# Altium footprint library Modulos.PcbLib: 11 footprints
Each footprint in its own frame and in the unit in brackets; x right, y up, seen from the top. Pads: shape width x height; smd on the part's side, far side on the other; paste and mask are expansions set on the pad; w line width, h text height; cw(c..) or ccw(c..) is an arc to the next point about the centre after c.
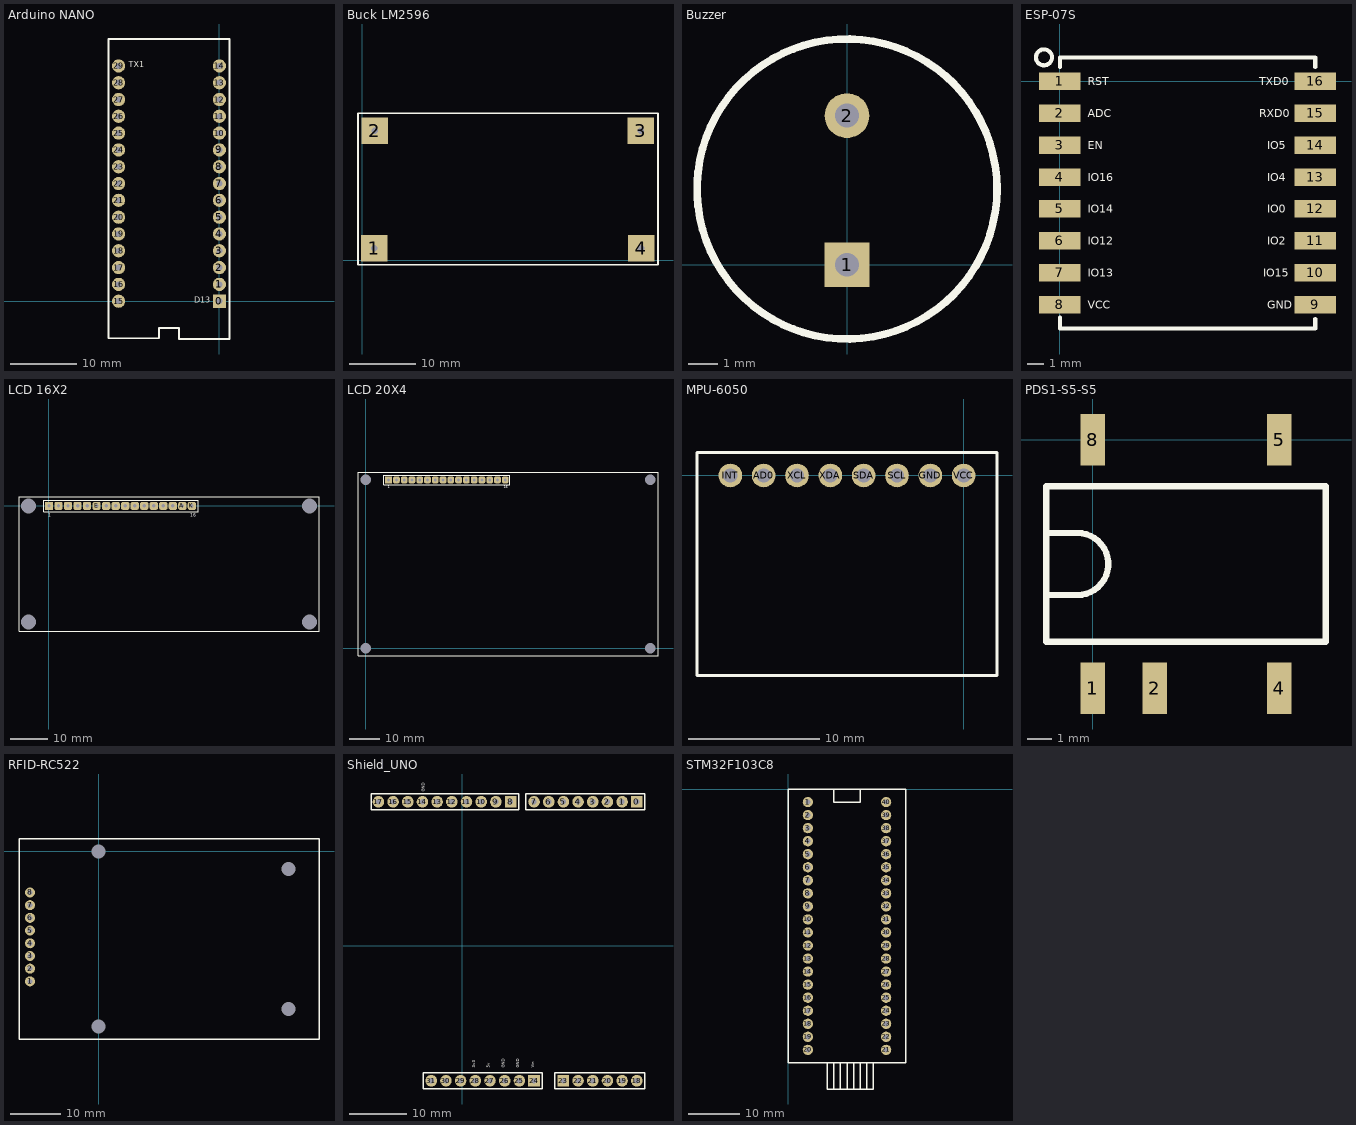
[diagram p0: the footprints below, top view; thin cyan lines are the x and y axes]

## Arduino NANO [mm]
pads (30):
  rect 2x2 hole 0.9: 0(0,0)
  round 2 hole 0.9: 1(0,2.54) 2(0,5.08) 3(0,7.62) 4(0,10.16) 5(0,12.7) 6(0,15.24) 7(0,17.78) 8(0,20.32) 9(0,22.86) 10(0,25.4) 11(0,27.94) 12(0,30.48) 13(0,33.02) 14(0,35.56) 15(-15.24,0) 16(-15.24,2.54) 17(-15.24,5.08) 18(-15.24,7.62) 19(-15.24,10.16) 20(-15.24,12.7) 21(-15.24,15.24) 22(-15.24,17.78) 23(-15.24,20.32) 24(-15.24,22.86) 25(-15.24,25.4) 26(-15.24,27.94) 27(-15.24,30.48) 28(-15.24,33.02) 29(-15.24,35.56)
Top Overlay:
  lines w0.254: -16.764,-5.588 -9.144,-5.588 -9.144,-4.064 -7.62,-4.064 -6.096,-4.064 -6.096,-5.715 1.524,-5.715 1.524,39.624 -16.764,39.624 -16.764,-5.588
  text "D13" at -3.81,-0.508 h1.52
  text "TX1" at -13.716,35.052 h1.52
3D body "User Library-ARDUINO_NANO_V3.STEP": height 16.1, standoff -2.5, extent -16.62,-5.62 1.38,39.38

## Buck LM2596 [mm]
pads (4):
  rect 4x4 hole 1: 1(1.803,1.803) 2(1.854,19.456) 3(41.808,19.456) 4(41.834,1.778)
Top Overlay:
  lines w0.254: -0.66,-0.66 44.374,-0.66 44.374,22.047 -0.66,22.047 -0.66,-0.66
3D body "LM2596_Buck_Converter.stp": height 13, standoff -1, extent 0.344,0 43.344,21.15

## Buzzer [mm] "AI-1027-TWT-5V-2-R"
pads (2):
  rect 1.5x1.5 hole 0.8: 1(0,0)
  round 1.5 hole 0.8: 2(0,5)
Top Overlay:
  circle w0.254: c0,2.54 r5.029
3D body "Buzzer_TDK_pitch_5.stp": height 9, standoff -2, extent -6.104,-3.56 6.096,8.64

## ESP-07S [mm] "ESP-07S WIFI MODULE"
pads (16):
  rect 2.6x1.1 smd: 1(0,0) 2(0,-2) 3(0,-4) 4(0,-6) 5(0,-8) 6(0,-10) 7(0,-12) 8(0,-14) 9(16,-14) 10(16,-12) 11(16,-10) 12(16,-8) 13(16,-6) 14(16,-4) 15(16,-2) 16(16,0)
Top Overlay:
  circle w0.254: c-1,1.5 r0.5
  lines w0.254: 0,-14.8 0,-15.5 16,-15.5 16,-14.9 ; 0,0.9 0,1.5 16,1.5 16,0.9
  text "RST" at 1.75,-0.25 h0.5
  text "ADC" at 1.75,-2.25 h0.5
  text "EN" at 1.75,-4.25 h0.5
  text "IO16" at 1.75,-6.25 h0.5
  text "IO14" at 1.75,-8.25 h0.5
  text "IO12" at 1.75,-10.25 h0.5
  text "IO13" at 1.75,-12.25 h0.5
  text "VCC" at 1.75,-14.25 h0.5
  text "GND" at 13,-14.25 h0.5
  text "IO15" at 12.75,-12.25 h0.5
  text "IO2" at 13,-10.25 h0.5
  text "IO0" at 13,-8.25 h0.5
  text "IO4" at 13,-6.25 h0.5
  text "IO5" at 13,-4.25 h0.5
  text "RXD0" at 12.5,-2.25 h0.5
  text "TXD0" at 12.5,-0.25 h0.5

## LCD 16X2 [mm]
pads (20):
  rrect50% 2.2x2.2 hole 0.9 unplated: A(35.56,0) D0(15.24,0) D1(17.78,0) D2(20.32,0) D3(22.86,0) D4(25.4,0) D5(27.94,0) D6(30.48,0) D7(33.02,0) E(12.7,0) K(38.1,0) RS(7.62,0) RW(10.16,0) VDD(2.54,0) VO(5.08,0)
  rect 2.2x2.2 hole 0.9 unplated: VSS(0,0)
  round 2 hole 4 unplated: ""(-5.5,-31) ""(-5.5,0) ""(69.5,-31) ""(69.5,0)
Top Overlay:
  lines w0.254: -8,-33.5 72,-33.5 72,2.5 -8,2.5 -8,-33.5 ; -1.414,-1.612 39.734,-1.612 39.734,1.436 -1.414,1.436 -1.414,-1.612
  text "16" at 37.702,-2.882 h0.89
  text "1" at -0.144,-2.882 h0.89
3D body "User Library-Header_Male_10Pin.STEP": height 10, standoff -1.54, extent -1.27,-1.245 24.13,1.245
3D body "User Library-Header_Male_6Pin.STEP": height 10, standoff -1.54, extent 24.13,-1.245 39.37,1.245
3D body "User Library-LCD 16x2 JHD162A.step": height 17.8, standoff 4.65, extent -8.021,-33.613 71.979,2.388

## LCD 20X4 [mm]
pads (20):
  rrect50% 2.2x2.2 hole 0.9 unplated: A(43.06,55) D0(22.74,55) D1(25.28,55) D2(27.82,55) D3(30.36,55) D4(32.9,55) D5(35.44,55) D6(37.98,55) D7(40.52,55) E(20.2,55) K(45.6,55) RS(15.12,55) RW(17.66,55) VDD(10.04,55) VO(12.58,55)
  rect 2.2x2.2 hole 0.9 unplated: VSS(7.5,55)
  round 1.524 hole 3.4 unplated: ""(0,0) ""(0,55) ""(93,0) ""(93,55)
Top Overlay:
  lines w0.254: -2.5,-2.46 95.5,-2.46 95.5,57.54 -2.5,57.54 -2.5,-2.46 ; 5.976,53.476 47.124,53.476 47.124,56.524 5.976,56.524 5.976,53.476
  text "16" at 45.092,52.206 h0.89
  text "1" at 7.246,52.206 h0.89
3D body "User Library-Header_Male_8Pin.STEP": height 10, standoff -1.54, extent 26.55,53.755 46.87,56.245
3D body "User Library-Header_Male_8Pin.STEP": height 10, standoff -1.54, extent 6.23,53.755 26.55,56.245
3D body "ERM2004-2_3D.stp": height 18.97, standoff 4.97, extent -2.511,-2.46 95.489,57.54

## MPU-6050 [mm]
pads (8):
  round 1.8 hole 1.1: AD0(-15.24,0) GND(-2.54,0) INT(-17.78,0) SCL(-5.08,0) SDA(-7.62,0) VCC(0,0) XCL(-12.7,0) XDA(-10.16,0)
Top Overlay:
  lines w0.254: -20.32,-15.24 2.54,-15.24 2.54,1.75 -20.32,1.75 -20.32,-15.24
3D body "MPU 6050 IMU.STEP": height 6.44, standoff -4.73, extent -19.304,-14.575 1.804,1.3

## PDS1-S5-S5 [mm]
pads (5):
  rect 1x2.1 smd: 1(0,-10.16) 2(2.54,-10.16) 4(7.62,-10.16) 5(7.62,0) 8(0,0)
Top Overlay:
  lines w0.254: -1.905,-6.35 -0.635,-6.35 ccw(c-0.635,-5.08) -0.635,-3.81 -1.905,-3.81 ; -1.905,-8.255 9.525,-8.255 9.525,-1.905 -1.905,-1.905 -1.905,-8.255
3D body "User Library-PDS1-S5-S5-M-TR.STEP": height 7.1, standoff 0.03, extent -2.54,-10.688 10.16,0.528

## RFID-RC522 [mm]
pads (12):
  round 2 hole 1: 1(-13.7,-25.98) 2(-13.7,-23.44) 3(-13.7,-20.9) 4(-13.7,-18.36) 5(-13.7,-15.82) 6(-13.7,-13.28) 7(-13.7,-10.74) 8(-13.7,-8.2)
  round 2 hole 2.8: ""(0,-34.98) ""(0,0) ""(38,-31.48) ""(38,-3.5)
Top Overlay:
  lines w0.254: -15.91,-37.512 -15.91,2.493 44.085,2.493 44.085,-37.512 -15.91,-37.512
3D body "RFID.STEP": height 7.74, standoff -3.8, extent -15.91,-37.522 44.09,2.478

## Shield_UNO [mm]
pads (32):
  rect 2x2 hole 0.9: 0(30.19,24.925) 8(8.346,24.925) 23(17.49,-23.335) 24(12.41,-23.335)
  round 2 hole 0.9: 1(27.65,24.925) 2(25.11,24.925) 3(22.57,24.925) 4(20.03,24.925) 5(17.49,24.925) 6(14.95,24.925) 7(12.41,24.925) 9(5.806,24.925) 10(3.266,24.925) 11(0.726,24.925) 12(-1.814,24.925) 13(-4.354,24.925) 14(-6.894,24.925) 15(-9.434,24.925) 16(-11.974,24.925) 17(-14.514,24.925) 18(30.19,-23.335) 19(27.65,-23.335) 20(25.11,-23.335) 21(22.57,-23.335) 22(20.03,-23.335) 25(9.87,-23.335) 26(7.33,-23.335) 27(4.79,-23.335) 28(2.25,-23.335) 29(-0.29,-23.335) 30(-2.83,-23.335) 31(-5.37,-23.335)
Top Overlay:
  lines w0.254: -15.784,23.546 9.754,23.546 9.754,26.314 -15.784,26.314 -15.784,23.546 ; -6.782,-24.714 -6.782,-21.946 13.818,-21.946 13.818,-24.714 -6.782,-24.714 ; 10.998,23.546 10.998,26.34 31.598,26.34 31.598,23.546 10.998,23.546 ; 16.002,-24.765 31.598,-24.765 31.598,-21.92 16.002,-21.92 16.002,-24.765
  text "GND" at 9.87,-21.123 h0.51
  text "GND" at 7.33,-21.123 h0.51
  text "5v" at 4.79,-21.123 h0.51
  text "3v3" at 2.25,-21.123 h0.51
  text "Vin" at 12.41,-21.123 h0.51
  text "GND" at -6.538,26.629 h0.51
3D body "User Library-Header_Male_10Pin.STEP": height 9.04, standoff -2.5, extent -15.784,23.68 9.616,26.17
3D body "User Library-Header_Male_8Pin.STEP": height 9.04, standoff -2.5, extent 11.14,23.68 31.46,26.17
3D body "User Library-Header_Male_8Pin.STEP": height 9.04, standoff -2.5, extent -6.64,-24.58 13.68,-22.09
3D body "User Library-Header_Male_6Pin.STEP": height 9.04, standoff -2.5, extent 16.2,-24.595 31.44,-22.105

## STM32F103C8 [mm] "Placa De Desenvolvimento Stm32f103c8t6 Arm"
pads (40):
  round 2 hole 1: 1(3.81,-2.54) 2(3.81,-5.08) 3(3.81,-7.62) 4(3.81,-10.16) 5(3.81,-12.7) 6(3.81,-15.24) 7(3.81,-17.78) 8(3.81,-20.32) 9(3.81,-22.86) 10(3.81,-25.4) 11(3.81,-27.94) 12(3.81,-30.48) 13(3.81,-33.02) 14(3.81,-35.56) 15(3.81,-38.1) 16(3.81,-40.64) 17(3.81,-43.18) 18(3.81,-45.72) 19(3.81,-48.26) 20(3.81,-50.8) 21(19.05,-50.8) 22(19.05,-48.26) 23(19.05,-45.72) 24(19.05,-43.18) 25(19.05,-40.64) 26(19.05,-38.1) 27(19.05,-35.56) 28(19.05,-33.02) 29(19.05,-30.48) 30(19.05,-27.94) 31(19.05,-25.4) 32(19.05,-22.86) 33(19.05,-20.32) 34(19.05,-17.78) 35(19.05,-15.24) 36(19.05,-12.7) 37(19.05,-10.16) 38(19.05,-7.62) 39(19.05,-5.08) 40(19.05,-2.54)
Top Overlay:
  lines w0.254: 7.62,-53.34 7.62,-58.42 16.51,-58.42 16.51,-53.34 ; 8.89,-58.42 8.89,-53.34 ; 8.89,0 8.89,-2.54 13.97,-2.54 13.97,0 ; 10.16,-58.42 10.16,-53.34 ; 11.43,-58.42 11.43,-53.34 ; 12.7,-58.42 12.7,-53.34 ; 13.97,-58.42 13.97,-53.34 ; 15.24,-58.42 15.24,-53.34 ; 0,-53.34 22.86,-53.34 22.86,0 0,0 0,-53.34
3D body "User Library-BluePill2.STEP": height 12.51, standoff -4.92, extent 0.18,-58.382 22.68,0.254